# Altium footprint library SMD RUS IC.PcbLib: 31 footprints (part 1 of 2)
Each footprint in its own frame and in the unit in brackets; x right, y up, seen from the top. Pads: shape width x height; smd on the part's side, far side on the other; paste and mask are expansions set on the pad; w line width, h text height; cw(c..) or ccw(c..) is an arc to the next point about the centre after c.
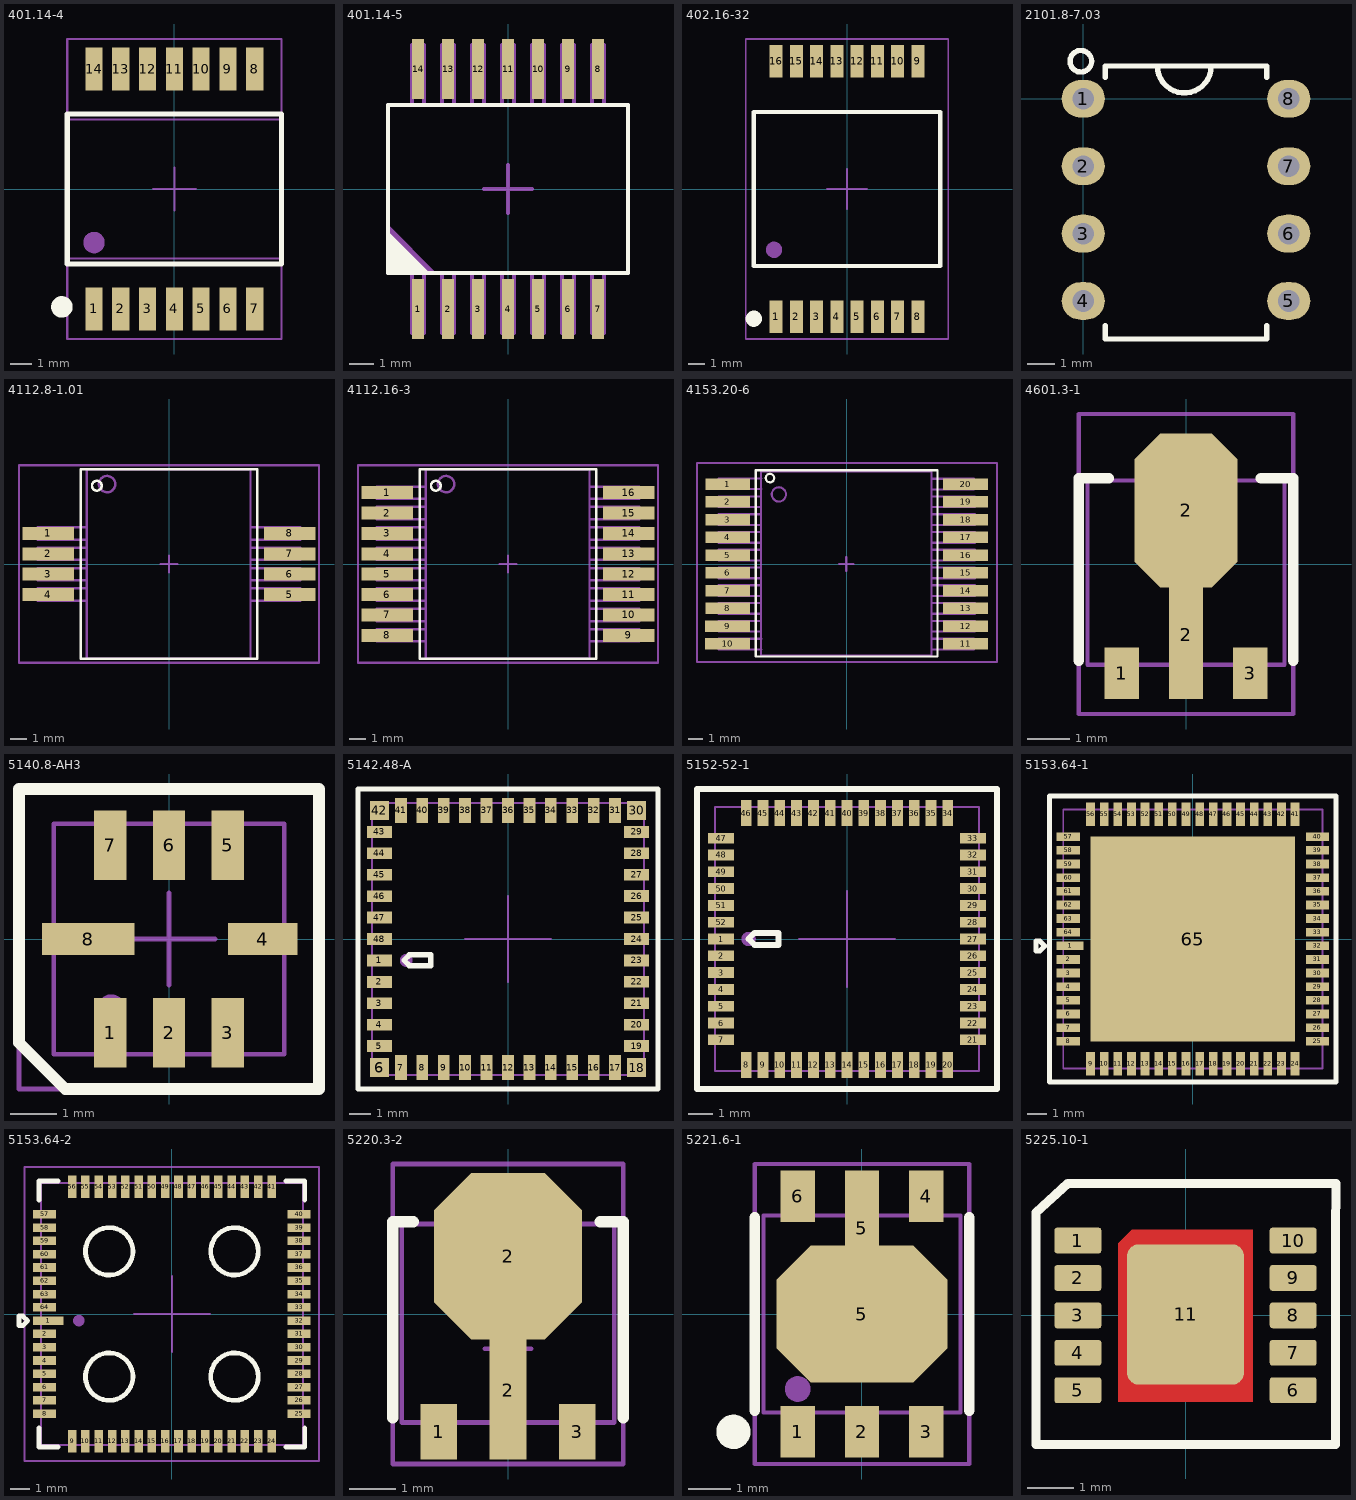
[diagram p0: the footprints below, top view; thin cyan lines are the x and y axes]

## 401.14-4 [mm]
pads (14):
  rect 0.8x2 smd: 1(-3.75,-5.6) 2(-2.5,-5.6) 3(-1.25,-5.6) 4(0,-5.6) 5(1.25,-5.6) 6(2.5,-5.6) 7(3.75,-5.6) 8(3.75,5.6) 9(2.5,5.6) 10(1.25,5.6) 11(0,5.6) 12(-1.25,5.6) 13(-2.5,5.6) 14(-3.75,5.6)
Top Overlay:
  circle w0.5: c-5.25,-5.5 r0.25
  lines w0.25: -5,-3.5 5,-3.5 5,3.5 -5,3.5 -5,-3.5
Mechanical 7:
  lines w0.05: -5,-7 5,-7 5,7 -5,7 -5,-7
  text ".Designator" at -3,-0.5 h2
Mechanical 13:
  circle w0.5: c-3.75,-2.5 r0.25
  lines w0.1: -5,-3.25 -5,3.25 5,3.25 5,-3.25 -5,-3.25
Mechanical 15:
  lines w0.1: -1,0 1,0 ; 0.001,-1 0.001,1 ; -5,-7 -5,7 5,7 5,-7 -5,-7
3D body "401,14-4.stp": height 2.4, standoff 0, extent -5,-7.25 5,7.25

## 401.14-5 [mm]
height 1.85
pads (14):
  rect 0.5x2.5 smd: 1(-3.75,-5) 2(-2.5,-5) 3(-1.25,-5) 4(0,-5) 5(1.25,-5) 6(2.5,-5) 7(3.75,-5) 8(3.75,5) 9(2.5,5) 10(1.25,5) 11(0,5) 12(-1.25,5) 13(-2.5,5) 14(-3.75,5)
Top Overlay:
  region: -5,-1.75 -5,-3.5 -3.25,-3.5
  lines w0.15: -5,-3.5 5,-3.5 5,3.5 -5,3.5 -5,-3.5
Mechanical 15:
  lines w0.15: -1,0 1,0 ; 0,-1 0,1
Mechanical 29:
  region: -5,-3.5 -5,-1.5 -3,-3.5
  lines w0.15: -4,-3.5 -4,-6 -3.5,-6 -3.5,-5.5 -3.5,-3.5 ; -4,3.5 -4,5.5 -4,6 -3.5,6 -3.5,3.5 ; -2.75,-3.5 -2.75,-6 -2.25,-6 -2.25,-5.5 -2.25,-3.5 ; -2.75,3.5 -2.75,5.5 -2.75,6 -2.25,6 -2.25,3.5 ; -1.5,-3.5 -1.5,-6 -1,-6 -1,-5.5 -1,-3.5 ; -1.5,3.5 -1.5,5.5 -1.5,6 -1,6 -1,3.5 ; -0.25,-3.5 -0.25,-6 0.25,-6 0.25,-5.5 0.25,-3.5 ; -0.25,3.5 -0.25,5.5 -0.25,6 0.25,6 0.25,3.5 ; 1,-3.5 1,-6 1.5,-6 1.5,-5.5 1.5,-3.5 ; 1,3.5 1,5.5 1,6 1.5,6 1.5,3.5 ; 2.25,-3.5 2.25,-6 2.75,-6 2.75,-5.5 2.75,-3.5 ; 2.25,3.5 2.25,5.5 2.25,6 2.75,6 2.75,3.5 ; 3.5,-3.5 3.5,-6 4,-6 4,-5.5 4,-3.5 ; 3.5,3.5 3.5,5.5 3.5,6 4,6 4,3.5 ; -5,-3.5 5,-3.5 5,3.5 -5,3.5 -5,-3.5
  text ".Designator" at -3.6,-0.3 h1
3D body "401.14-5.STEP": height 3, standoff -0.03, extent -5,-6.35 5,6.35

## 402.16-32 [mm]
pads (16):
  rect 0.8x2 smd: 1(-4.375,-7.875) 2(-3.125,-7.875) 3(-1.875,-7.875) 4(-0.625,-7.875) 5(0.625,-7.875) 6(1.875,-7.875) 7(3.125,-7.875) 8(4.375,-7.875) 9(4.375,7.875) 10(3.125,7.875) 11(1.875,7.875) 12(0.625,7.875) 13(-0.625,7.875) 14(-1.875,7.875) 15(-3.125,7.875) 16(-4.375,7.875)
Top Overlay:
  circle w0.5: c-5.75,-8 r0.25
  lines w0.25: -5.75,-4.75 -5.75,4.75 5.75,4.75 5.75,-4.75 -5.75,-4.75
Mechanical 7:
  lines w0.05: -6.25,-9.25 6.25,-9.25 6.25,9.25 -6.25,9.25 -6.25,-9.25
  text ".Designator" at -3,-0.5 h2
Mechanical 13:
  circle w0.5: c-4.5,-3.75 r0.25
  lines w0.1: -5.75,-4.75 5.75,-4.75 5.75,4.75 -5.75,4.75 -5.75,-4.75
Mechanical 15:
  lines w0.1: -1.25,0 1.25,0 ; 0,-1.25 0,1.25 ; -6.25,-9.25 6.25,-9.25 6.25,9.25 -6.25,9.25 -6.25,-9.25
3D body "User Library-402_16-23.step": height 2.35, standoff 0, extent -5.75,-8.068 5.799,8.067

## 2101.8-7.03 [mm]
pads (8):
  oval 1.6x1.4 / inner round 1.4 / far side oval 2.2x1.4 hole 0.8: 1(0,0) 2(0,-2.5) 3(0,-5) 4(0,-7.5) 5(7.62,-7.5) 6(7.62,-5) 7(7.62,-2.5) 8(7.62,0)
Top Overlay:
  circle w0.2: c-0.09,1.39 r0.4
  lines w0.2: 0.81,-8.41 0.81,-8.91 6.81,-8.91 6.81,-8.41 ; 0.81,0.79 0.81,1.215 6.81,1.215 6.81,0.79 ; 2.746,1.215 ccw(c3.746,1.215) 4.746,1.215
3D body "User Library-2101_8-7.x_b": height 4.8, standoff -2.4, extent -0.075,-8.76 7.745,1.24

## 4112.8-1.01 [mm] "CFP, 8-Leads, Body 11,60x9,40mm (max), Pitch 1,25mm, IPC Medium Density"
height 3
pads (8):
  rect 3.15x0.8 smd: 1(-7.4,1.875) 2(-7.4,0.625) 3(-7.4,-0.625) 4(-7.4,-1.875) 5(7.4,-1.875) 6(7.4,-0.625) 7(7.4,0.625) 8(7.4,1.875)
Top Overlay:
  circle w0.15: c-4.425,4.8 r0.3
  lines w0.15: -5.425,-5.8 5.425,-5.8 5.425,5.8 -5.425,5.8 -5.425,-5.8
Mechanical 15:
  lines w0.15: -0.5,0 0.5,0 ; 0,-0.5 0,0.5 ; -9.2,-6.05 9.2,-6.05 9.2,6.05 -9.2,6.05 -9.2,-6.05
Mechanical 29:
  circle w0.15: c-3.8,4.9 r0.5
  lines w0.15: -5.05,-2.25 -8.05,-2.25 -8.05,-1.5 -5.05,-1.5 ; -5.05,-1 -8.05,-1 -8.05,-0.25 -5.05,-0.25 ; -5.05,0.25 -8.05,0.25 -8.05,1 -5.05,1 ; -5.05,1.5 -8.05,1.5 -8.05,2.25 -5.05,2.25 ; 5.05,-2.25 8.05,-2.25 8.05,-1.5 5.05,-1.5 ; 5.05,-1 8.05,-1 8.05,-0.25 5.05,-0.25 ; 5.05,0.25 8.05,0.25 8.05,1 5.05,1 ; 5.05,1.5 8.05,1.5 8.05,2.25 5.05,2.25 ; -5.05,-5.8 5,-5.8 5,5.8 -5.05,5.8 -5.05,-5.8
  text ".Designator" at -3.7,-0.3 h1
3D body "User Library-4112_8-1.x_b": height 2.65, standoff 0, extent -8.067,-5.75 8.067,5.75

## 4112.16-3 [mm] "CFP, 16-Leads, Body 11,60x9,40mm (max), Pitch 1,25mm, IPC Medium Density"
height 3
pads (16):
  rect 3.15x0.8 smd: 1(-7.4,4.375) 2(-7.4,3.125) 3(-7.4,1.875) 4(-7.4,0.625) 5(-7.4,-0.625) 6(-7.4,-1.875) 7(-7.4,-3.125) 8(-7.4,-4.375) 9(7.4,-4.375) 10(7.4,-3.125) 11(7.4,-1.875) 12(7.4,-0.625) 13(7.4,0.625) 14(7.4,1.875) 15(7.4,3.125) 16(7.4,4.375)
Top Overlay:
  circle w0.15: c-4.425,4.8 r0.3
  lines w0.15: -5.425,-5.8 -5.425,5.8 5.425,5.8 5.425,-5.8 -5.425,-5.8
Mechanical 15:
  lines w0.15: -0.5,0 0.5,0 ; 0,-0.5 0,0.5 ; -9.2,-6.05 -9.2,6.05 9.2,6.05 9.2,-6.05 -9.2,-6.05
Mechanical 29:
  circle w0.15: c-3.8,4.9 r0.5
  lines w0.15: -5.05,-4.75 -8.05,-4.75 -8.05,-4 -5.05,-4 ; -5.05,-3.5 -8.05,-3.5 -8.05,-2.75 -5.05,-2.75 ; -5.05,-2.25 -8.05,-2.25 -8.05,-1.5 -5.05,-1.5 ; -5.05,-1 -8.05,-1 -8.05,-0.25 -5.05,-0.25 ; -5.05,0.25 -8.05,0.25 -8.05,1 -5.05,1 ; -5.05,1.5 -8.05,1.5 -8.05,2.25 -5.05,2.25 ; -5.05,2.75 -8.05,2.75 -8.05,3.5 -5.05,3.5 ; -5.05,4 -8.05,4 -8.05,4.75 -5.05,4.75 ; 5.05,-4.75 8.05,-4.75 8.05,-4 5.05,-4 ; 5.05,-3.5 8.05,-3.5 8.05,-2.75 5.05,-2.75 ; 5.05,-2.25 8.05,-2.25 8.05,-1.5 5.05,-1.5 ; 5.05,-1 8.05,-1 8.05,-0.25 5.05,-0.25 ; 5.05,0.25 8.05,0.25 8.05,1 5.05,1 ; 5.05,1.5 8.05,1.5 8.05,2.25 5.05,2.25 ; 5.05,2.75 8.05,2.75 8.05,3.5 5.05,3.5 ; 5.05,4 8.05,4 8.05,4.75 5.05,4.75 ; -5.05,-5.8 -5.05,5.8 5,5.8 5,-5.8 -5.05,-5.8
  text ".Designator" at -3.7,-0.3 h1
3D body "4112.16-3.step": height 2.5, standoff 0, extent -8.5,-5.8 8.5,5.8

## 4153.20-6 [mm] "CFP, 20-Leads, Body 11.80x13.25mm (max), Pitch 1,25mm, IPC Medium Density"
height 3
pads (20):
  rect 3.15x0.8 smd: 1(-8.37,5.625) 2(-8.37,4.375) 3(-8.37,3.125) 4(-8.37,1.875) 5(-8.37,0.625) 6(-8.37,-0.625) 7(-8.37,-1.875) 8(-8.37,-3.125) 9(-8.38,-4.375) 10(-8.38,-5.625) 11(8.38,-5.625) 12(8.38,-4.375) 13(8.38,-3.125) 14(8.38,-1.875) 15(8.38,-0.625) 16(8.38,0.625) 17(8.38,1.875) 18(8.38,3.125) 19(8.38,4.375) 20(8.38,5.625)
Top Overlay:
  circle w0.15: c-5.395,6.05 r0.3
  lines w0.15: 6.4,-6.52 -6.395,-6.52 -6.395,6.6 6.405,6.6 6.405,-6.52
Mechanical 15:
  lines w0.15: -0.52,0 0.48,0 ; -0.02,-0.5 -0.02,0.5 ; -10.53,-6.91 10.59,-6.91 10.59,7.1 -10.53,7.1 -10.53,-6.91
Mechanical 29:
  circle w0.15: c-4.77,4.9 r0.5
  lines w0.15: -6.02,-4.75 -9.02,-4.75 -9.02,-4 -6.02,-4 ; -6.02,-3.5 -9.02,-3.5 -9.02,-2.75 -6.02,-2.75 ; -6.02,-2.25 -9.02,-2.25 -9.02,-1.5 -6.02,-1.5 ; -6.02,-1 -9.02,-1 -9.02,-0.25 -6.02,-0.25 ; -6.02,0.25 -9.02,0.25 -9.02,1 -6.02,1 ; -6.02,1.5 -9.02,1.5 -9.02,2.25 -6.02,2.25 ; -6.02,2.75 -9.02,2.75 -9.02,3.5 -6.02,3.5 ; -6.02,4 -9.02,4 -9.02,4.75 -6.02,4.75 ; -6.01,-6.01 -9.01,-6.01 -9.01,-5.26 -6.01,-5.26 ; -6.01,5.27 -9.01,5.27 -9.01,6.02 -6.01,6.02 ; 5.97,-6.01 8.97,-6.01 8.97,-5.26 5.97,-5.26 ; 5.98,5.25 8.98,5.25 8.98,6 5.98,6 ; 6.03,-4.75 9.03,-4.75 9.03,-4 6.03,-4 ; 6.03,-3.5 9.03,-3.5 9.03,-2.75 6.03,-2.75 ; 6.03,-2.25 9.03,-2.25 9.03,-1.5 6.03,-1.5 ; 6.03,-1 9.03,-1 9.03,-0.25 6.03,-0.25 ; 6.03,0.25 9.03,0.25 9.03,1 6.03,1 ; 6.03,1.5 9.03,1.5 9.03,2.25 6.03,2.25 ; 6.03,2.75 9.03,2.75 9.03,3.5 6.03,3.5 ; 6.03,4 9.03,4 9.03,4.75 6.03,4.75 ; -6.02,-6.44 5.98,-6.44 5.98,6.52 -6.02,6.52 -6.02,-6.44
  text ".Designator" at -4.67,-0.3 h1
3D body "User Library-4153_20-6.step": height 3.14, standoff 0.1, extent -8.84,-6.5 8.66,6.5

## 4601.3-1 [mm]
height 1.6
pads (4):
  rect 0.8x1.2 smd: 1(-1.5,-2.55) 3(1.5,-2.55)
  rect 0.8x3 smd: 2(0,-1.65)
  oct 2.4x3.6 smd: 2(0,1.25)
Top Overlay:
  lines w0.25: -2.5,-2.25 -2.5,2 -1.8,2 ; 1.75,2 2.45,2 ; 2.5,-2.25 2.5,2
Mechanical 7:
  lines w0.05: -2.5,-3.5 -2.5,3.5 2.5,3.5 2.5,-3.5 -2.5,-3.5
  text ".Designator" at -2,-0.5 h1.5
Mechanical 13:
  lines w0.1: -1.8,-2.35 -1.8,-2.95 -1.2,-2.95 -1.2,-2.35 ; -0.3,-2.35 -0.3,-2.95 0.3,-2.95 0.3,-2.35 ; -0.3,1.95 -0.3,2.55 0.3,2.55 0.3,1.95 ; 1.2,-2.35 1.2,-2.95 1.8,-2.95 1.8,-2.35 ; -2.3,-2.35 2.3,-2.35 2.3,1.95 -2.3,1.95 -2.3,-2.35
Mechanical 15:
  lines w0.1: -0.5,0 0.5,0 ; 0,-0.5 0,0.5 ; -2.5,-3.5 2.5,-3.5 2.5,3.5 -2.5,3.5 -2.5,-3.5
3D body "User Library-4601_3-1.step": height 1.74, standoff 0, extent -2.3,-3.1 2.3,2.1

## 5140.8-АН3 [mm]
height 1.95
pads (8):
  rect 0.7x1.5 smd: 1(-1.27,-2.032) 2(0,-2.032) 3(1.27,-2.032) 5(1.27,2.032) 6(0,2.032) 7(-1.27,2.032)
  rect 1.5x0.7 smd: 4(2.032,0)
  rect 2x0.7 smd: 8(-1.75,0)
Top Overlay:
  lines w0.25: -3.25,-2.25 -2.25,-3.25 3.25,-3.25 3.25,3.25 -3.25,3.25 -3.25,-2.25
Mechanical 7:
  lines w0.05: -3.25,-3.25 3.25,-3.25 3.25,3.25 -3.25,3.25 -3.25,-3.25
  text ".Designator" at -2,-0.5 h1.5
Mechanical 13:
  circle w0.3: c-1.25,-1.5 r0.15
  lines w0.1: -2.5,-2.5 -2.5,2.5 2.5,2.5 2.5,-2.5 -2.5,-2.5
Mechanical 15:
  lines w0.1: -1,0 1,0 ; 0,-1 0,1 ; -3.25,-3.25 -3.25,3.25 3.25,3.25 3.25,-3.25 -3.25,-3.25
3D body: height 0.05, standoff 0, extent 1.125,-0.5 2.375,0.5
3D body: height 1.5, standoff 0.05, extent -2.5,-2.5 2.5,2.5
3D body: height 1.8, standoff 1.5, extent -2.25,-2.25 2.25,2.25
3D body: height 1.85, standoff 1.8, extent -2.2,-2.2 2.2,2.2
3D body: height 1.95, standoff 1.8, extent -2.15,-2.15 2.15,2.15
3D body: height 0.05, standoff 0, extent 0.75,1.125 1.75,2.375
3D body: height 0.05, standoff 0, extent -0.5,1.125 0.5,2.375
3D body: height 0.05, standoff 0, extent -1.75,1.125 -0.75,2.375
3D body: height 0.05, standoff 0, extent 0.775,-2.375 1.775,-1.125
3D body: height 0.05, standoff 0, extent -0.5,-2.375 0.5,-1.125
3D body: height 0.05, standoff 0, extent -1.75,-2.375 -0.75,-1.125
3D body: height 0.05, standoff 0, extent -2.375,-0.5 -0.5,0.5
3D body: height 1.45, standoff 0, extent 2.125,-0.5 2.375,0.5
3D body: height 1.45, standoff 0, extent 0.75,2.125 1.75,2.375
3D body: height 1.45, standoff 0, extent -0.5,2.125 0.5,2.375
3D body: height 1.45, standoff 0, extent -1.75,2.125 -0.75,2.375
3D body: height 1.45, standoff 0, extent -2.375,-0.5 -2.125,0.5
3D body: height 1.45, standoff 0, extent -1.75,-2.375 -0.75,-2.125
3D body: height 1.45, standoff 0, extent -0.5,-2.375 0.5,-2.125
3D body: height 1.45, standoff 0, extent 0.775,-2.375 1.775,-2.125

## 5142.48-A [mm]
height 2.5
pads (48):
  rect 1.15x0.55 smd: 1(-6,-1) 2(-6,-2) 3(-6,-3) 4(-6,-4) 5(-6,-5) 19(6,-5) 20(6,-4) 21(6,-3) 22(6,-2) 23(6,-1) 24(6,0) 25(6,1) 26(6,2) 27(6,3) 28(6,4) 29(6,5) 43(-6,5) 44(-6,4) 45(-6,3) 46(-6,2) 47(-6,1) 48(-6,0)
  rect 0.9x0.9 smd: 6(-6,-6) 18(6,-6) 30(6,6) 42(-6,6)
  rect 0.55x1.15 smd: 7(-5,-6) 8(-4,-6) 9(-3,-6) 10(-2,-6) 11(-1,-6) 12(0,-6) 13(1,-6) 14(2,-6) 15(3,-6) 16(4,-6) 17(5,-6) 31(5,6) 32(4,6) 33(3,6) 34(2,6) 35(1,6) 36(0,6) 37(-1,6) 38(-2,6) 39(-3,6) 40(-4,6) 41(-5,6)
Top Overlay:
  lines w0.25: -7,-7 -7,7 7,7 7,-7 -7,-7 ; -4.856,-0.992 -4.606,-1.242 -3.606,-1.242 -3.606,-0.742 -4.606,-0.742 -4.856,-0.992
Mechanical 7:
  lines w0.05: -7,-7 7,-7 7,7 -7,7 -7,-7
  text ".Designator" at -3,-0.5 h2
Mechanical 13:
  circle w0.3: c-4.75,-1 r0.15
  lines w0.1: -6.35,-6.35 6.35,-6.35 6.35,6.35 -6.35,6.35 -6.35,-6.35
Mechanical 15:
  lines w0.1: -2,0 2,0 ; 0,-2 0,2 ; -7,-7 -7,7 7,7 7,-7 -7,-7
3D body "5142.48-A.stp": height 2.12, standoff 0, extent -6.35,-6.35 6.35,6.35

## 5152-52-1 [mm]
height 2.06
pads (52):
  rect 1.1x0.45 smd: 1(-5.25,0) 2(-5.25,-0.7) 3(-5.25,-1.4) 4(-5.25,-2.1) 5(-5.25,-2.8) 6(-5.25,-3.5) 7(-5.25,-4.2) 21(5.25,-4.2) 22(5.25,-3.5) 23(5.25,-2.8) 24(5.25,-2.1) 25(5.25,-1.4) 26(5.25,-0.7) 27(5.25,0) 28(5.25,0.7) 29(5.25,1.4) 30(5.25,2.1) 31(5.25,2.8) 32(5.25,3.5) 33(5.25,4.2) 47(-5.25,4.2) 48(-5.25,3.5) 49(-5.25,2.8) 50(-5.25,2.1) 51(-5.25,1.4) 52(-5.25,0.7)
  rect 0.45x1.1 smd: 8(-4.2,-5.25) 9(-3.5,-5.25) 10(-2.8,-5.25) 11(-2.1,-5.25) 12(-1.4,-5.25) 13(-0.7,-5.25) 14(0,-5.25) 15(0.7,-5.25) 16(1.4,-5.25) 17(2.1,-5.25) 18(2.8,-5.25) 19(3.5,-5.25) 20(4.2,-5.25) 34(4.2,5.25) 35(3.5,5.25) 36(2.8,5.25) 37(2.1,5.25) 38(1.4,5.25) 39(0.7,5.25) 40(0,5.25) 41(-0.7,5.25) 42(-1.4,5.25) 43(-2.1,5.25) 44(-2.8,5.25) 45(-3.5,5.25) 46(-4.2,5.25)
Top Overlay:
  lines w0.25: -6.25,-6.25 6.25,-6.25 6.25,6.25 -6.25,6.25 -6.25,-6.25 ; -4.106,0.008 -3.856,0.258 -2.856,0.258 -2.856,-0.242 -3.856,-0.242 -4.106,0.008
Mechanical 7:
  lines w0.05: -6.25,-6.25 -6.25,6.25 6.25,6.25 6.25,-6.25 -6.25,-6.25
  text ".Designator" at -3,-0.5 h2
Mechanical 13:
  circle w0.3: c-4.1,0 r0.15
  lines w0.1: -5.5,-5.5 -5.5,5.5 5.5,5.5 5.5,-5.5 -5.5,-5.5
Mechanical 15:
  lines w0.1: -2,0 2,0 ; 0,-2 0,2 ; -6.25,-6.25 6.25,-6.25 6.25,6.25 -6.25,6.25 -6.25,-6.25
3D body: height 1, standoff 0.01, extent 3.3,5.5 3.7,5.575
3D body: height 1, standoff 0.01, extent 4,5.5 4.4,5.575
3D body: height 1, standoff 0.01, extent 1.9,5.5 2.3,5.575
3D body: height 1, standoff 0.01, extent 2.6,5.5 3,5.575
3D body: height 1, standoff 0.01, extent 1.2,5.5 1.6,5.575
3D body: height 1, standoff 0.01, extent 0.5,5.5 0.9,5.575
3D body: height 1, standoff 0.01, extent -0.9,5.5 -0.5,5.575
3D body: height 1, standoff 0.01, extent -0.2,5.5 0.2,5.575
3D body: height 1, standoff 0.01, extent -2.3,5.5 -1.9,5.575
3D body: height 1, standoff 0.01, extent -1.6,5.5 -1.2,5.575
3D body: height 1, standoff 0.01, extent -3,5.5 -2.6,5.575
3D body: height 1, standoff 0.01, extent -3.7,5.5 -3.3,5.575
3D body: height 1, standoff 0.01, extent -4.4,5.5 -4,5.575
3D body: height 1, standoff 0.01, extent 5.5,-3.7 5.575,-3.3
3D body: height 1, standoff 0.01, extent 5.5,-4.4 5.575,-4
3D body: height 1, standoff 0.01, extent 5.5,-2.3 5.575,-1.9
3D body: height 1, standoff 0.01, extent 5.5,-3 5.575,-2.6
3D body: height 1, standoff 0.01, extent 5.5,-1.6 5.575,-1.2
3D body: height 1, standoff 0.01, extent 5.5,-0.9 5.575,-0.5
3D body: height 1, standoff 0.01, extent 5.5,0.5 5.575,0.9
3D body: height 1, standoff 0.01, extent 5.5,-0.2 5.575,0.2
3D body: height 1, standoff 0.01, extent 5.5,1.9 5.575,2.3
3D body: height 1, standoff 0.01, extent 5.5,1.2 5.575,1.6
3D body: height 1, standoff 0.01, extent 5.5,2.6 5.575,3
3D body: height 1, standoff 0.01, extent 5.5,3.3 5.575,3.7
3D body: height 1, standoff 0.01, extent 5.5,4 5.575,4.4
3D body: height 1, standoff 0.01, extent 4,-5.575 4.4,-5.5
3D body: height 1, standoff 0.01, extent 3.3,-5.575 3.7,-5.5
3D body: height 1, standoff 0.01, extent 2.6,-5.575 3,-5.5
3D body: height 1, standoff 0.01, extent 1.2,-5.575 1.6,-5.5
3D body: height 1, standoff 0.01, extent 1.9,-5.575 2.3,-5.5
3D body: height 1, standoff 0.01, extent -0.2,-5.575 0.2,-5.5
3D body: height 1, standoff 0.01, extent 0.5,-5.575 0.9,-5.5
3D body: height 1, standoff 0.01, extent -0.9,-5.575 -0.5,-5.5
3D body: height 1, standoff 0.01, extent -1.6,-5.575 -1.2,-5.5
3D body: height 1, standoff 0.01, extent -3,-5.575 -2.6,-5.5
3D body: height 1, standoff 0.01, extent -2.3,-5.575 -1.9,-5.5
3D body: height 1, standoff 0.01, extent -4.4,-5.575 -4,-5.5
3D body: height 1, standoff 0.01, extent -3.7,-5.575 -3.3,-5.5
3D body: height 1, standoff 0.01, extent -5.575,-4.4 -5.5,-4
3D body: height 1, standoff 0.01, extent -5.575,-3.7 -5.5,-3.3
3D body: height 1, standoff 0.01, extent -5.575,-2.3 -5.5,-1.9
3D body: height 1, standoff 0.01, extent -5.575,-3 -5.5,-2.6
3D body: height 1, standoff 0.01, extent -5.575,-0.9 -5.5,-0.5
3D body: height 1, standoff 0.01, extent -5.575,-1.6 -5.5,-1.2
3D body: height 1, standoff 0.01, extent -5.575,3.3 -5.5,3.7
3D body: height 1, standoff 0.01, extent -5.575,4 -5.5,4.4
3D body: height 1, standoff 0.01, extent -5.575,1.9 -5.5,2.3
3D body: height 1, standoff 0.01, extent -5.575,2.6 -5.5,3
3D body: height 1, standoff 0.01, extent -5.575,1.2 -5.5,1.6
3D body: height 1, standoff 0.01, extent -5.575,0.5 -5.5,0.9
3D body: height 1.6, standoff 0.01, extent -5.575,-0.2 -5.5,0.2
3D body: height 1.6, standoff 1.5, extent -5.5,-0.2 -4,0.2
3D body: height 1.9, standoff 1.5, extent -4.5,-4.5 4.5,4.5
3D body: height 2, standoff 1.9, extent -4,-4 4,4
3D body: height 1.5, standoff 0.01, extent -5.5,-5.5 5.5,5.5

## 5153.64-1 [mm]
height 2.06
pads (65):
  rect 1.4x0.45 smd: 1(-6.3,-0.35)
  rect 1.2x0.45 smd: 2(-6.4,-1.05) 3(-6.4,-1.75) 4(-6.4,-2.45) 5(-6.4,-3.15) 6(-6.4,-3.85) 7(-6.4,-4.55) 8(-6.4,-5.25) 25(6.4,-5.25) 26(6.4,-4.55) 27(6.4,-3.85) 28(6.4,-3.15) 29(6.4,-2.45) 30(6.4,-1.75) 31(6.4,-1.05) 32(6.4,-0.35) 33(6.4,0.35) 34(6.4,1.05) 35(6.4,1.75) 36(6.4,2.45) 37(6.4,3.15) 38(6.4,3.85) 39(6.4,4.55) 40(6.4,5.25) 57(-6.4,5.25) 58(-6.4,4.55) 59(-6.4,3.85) 60(-6.4,3.15) 61(-6.4,2.45) 62(-6.4,1.75) 63(-6.4,1.05) 64(-6.4,0.35)
  rect 0.45x1.2 smd: 9(-5.25,-6.4) 10(-4.55,-6.4) 11(-3.85,-6.4) 12(-3.15,-6.4) 13(-2.45,-6.4) 14(-1.75,-6.4) 15(-1.05,-6.4) 16(-0.35,-6.4) 17(0.35,-6.4) 18(1.05,-6.4) 19(1.75,-6.4) 20(2.45,-6.4) 21(3.15,-6.4) 22(3.85,-6.4) 23(4.55,-6.4) 24(5.25,-6.4) 41(5.25,6.4) 42(4.55,6.4) 43(3.85,6.4) 44(3.15,6.4) 45(2.45,6.4) 46(1.75,6.4) 47(1.05,6.4) 48(0.35,6.4) 49(-0.35,6.4) 50(-1.05,6.4) 51(-1.75,6.4) 52(-2.45,6.4) 53(-3.15,6.4) 54(-3.85,6.4) 55(-4.55,6.4) 56(-5.25,6.4)
  rect 10.5x10.5 smd: 65(0,0)
Top Overlay:
  lines w0.25: -8.05,-0.608 -8.05,-0.108 -7.844,-0.108 -7.594,-0.358 -7.844,-0.608 -8.05,-0.608 ; -7.35,-7.35 7.35,-7.35 7.35,7.35 -7.35,7.35 -7.35,-7.35
Mechanical 7:
  lines w0.05: -7.35,-7.35 -7.35,7.35 7.35,7.35 7.35,-7.35 -7.35,-7.35
  text ".Designator" at -3,-0.5 h2
Mechanical 13:
  circle w0.3: c-4.9,-0.35 r0.15
  lines w0.1: -6.65,-6.65 -6.65,6.65 6.65,6.65 6.65,-6.65 -6.65,-6.65
  text "Check!" at -3.5,-0.5 h1.52
Mechanical 15:
  lines w0.1: -2,0 2,0 ; 0,-2 0,2 ; -7.35,-7.35 7.35,-7.35 7.35,7.35 -7.35,7.35 -7.35,-7.35
3D body: height 1, standoff 0.01, extent -6.725,-1.95 -6.65,-1.55
3D body: height 1.9, standoff 1.5, extent -5.6,-5.6 5.6,5.6
3D body: height 2, standoff 1.9, extent -5.25,-5.25 5.25,5.25
3D body: height 1.5, standoff 0.01, extent -6.65,-6.65 6.65,6.65
3D body: height 1, standoff 0.01, extent -6.725,-1.25 -6.65,-0.85
3D body: height 1, standoff 0.01, extent -6.725,-2.65 -6.65,-2.25
3D body: height 1, standoff 0.01, extent -6.725,-3.35 -6.65,-2.95
3D body: height 1, standoff 0.01, extent -6.725,-4.05 -6.65,-3.65
3D body: height 1, standoff 0.01, extent -6.725,-4.75 -6.65,-4.35
3D body: height 1, standoff 0.01, extent -6.725,-5.45 -6.65,-5.05
3D body: height 1, standoff 0.01, extent -6.725,5.05 -6.65,5.45
3D body: height 1, standoff 0.01, extent -6.725,4.35 -6.65,4.75
3D body: height 1, standoff 0.01, extent -6.725,3.65 -6.65,4.05
3D body: height 1, standoff 0.01, extent -6.725,2.95 -6.65,3.35
3D body: height 1, standoff 0.01, extent -6.725,2.25 -6.65,2.65
3D body: height 1, standoff 0.01, extent -6.725,1.55 -6.65,1.95
3D body: height 1, standoff 0.01, extent -6.725,0.85 -6.65,1.25
3D body: height 1, standoff 0.01, extent -6.725,0.15 -6.65,0.55
3D body: height 1, standoff 0.01, extent 0.15,6.65 0.55,6.725
3D body: height 1, standoff 0.01, extent 0.85,6.65 1.25,6.725
3D body: height 1, standoff 0.01, extent 1.55,6.65 1.95,6.725
3D body: height 1, standoff 0.01, extent 2.25,6.65 2.65,6.725
3D body: height 1, standoff 0.01, extent 2.95,6.65 3.35,6.725
3D body: height 1, standoff 0.01, extent 3.65,6.65 4.05,6.725
3D body: height 1, standoff 0.01, extent 4.35,6.65 4.75,6.725
3D body: height 1, standoff 0.01, extent 5.05,6.65 5.45,6.725
3D body: height 1, standoff 0.01, extent -5.45,6.65 -5.05,6.725
3D body: height 1, standoff 0.01, extent -4.75,6.65 -4.35,6.725
3D body: height 1, standoff 0.01, extent -4.05,6.65 -3.65,6.725
3D body: height 1, standoff 0.01, extent -3.35,6.65 -2.95,6.725
3D body: height 1, standoff 0.01, extent -2.65,6.65 -2.25,6.725
3D body: height 1, standoff 0.01, extent -1.95,6.65 -1.55,6.725
3D body: height 1, standoff 0.01, extent -1.25,6.65 -0.85,6.725
3D body: height 1, standoff 0.01, extent -0.55,6.65 -0.15,6.725
3D body: height 1, standoff 0.01, extent 0.15,-6.725 0.55,-6.65
3D body: height 1, standoff 0.01, extent 0.85,-6.725 1.25,-6.65
3D body: height 1, standoff 0.01, extent 1.55,-6.725 1.95,-6.65
3D body: height 1, standoff 0.01, extent 2.25,-6.725 2.65,-6.65
3D body: height 1, standoff 0.01, extent 2.95,-6.725 3.35,-6.65
3D body: height 1, standoff 0.01, extent 3.65,-6.725 4.05,-6.65
3D body: height 1, standoff 0.01, extent 4.35,-6.725 4.75,-6.65
3D body: height 1, standoff 0.01, extent 5.05,-6.725 5.45,-6.65
3D body: height 1, standoff 0.01, extent -5.45,-6.725 -5.05,-6.65
3D body: height 1, standoff 0.01, extent -4.75,-6.725 -4.35,-6.65
3D body: height 1, standoff 0.01, extent -4.05,-6.725 -3.65,-6.65
3D body: height 1, standoff 0.01, extent -3.35,-6.725 -2.95,-6.65
3D body: height 1, standoff 0.01, extent -2.65,-6.725 -2.25,-6.65
3D body: height 1, standoff 0.01, extent -1.95,-6.725 -1.55,-6.65
3D body: height 1, standoff 0.01, extent -1.25,-6.725 -0.85,-6.65
3D body: height 1, standoff 0.01, extent -0.55,-6.725 -0.15,-6.65
3D body: height 1, standoff 0.01, extent 6.65,0.15 6.725,0.55
3D body: height 1, standoff 0.01, extent 6.65,0.85 6.725,1.25
3D body: height 1, standoff 0.01, extent 6.65,1.55 6.725,1.95
3D body: height 1, standoff 0.01, extent 6.65,2.25 6.725,2.65
3D body: height 1, standoff 0.01, extent 6.65,2.95 6.725,3.35
3D body: height 1, standoff 0.01, extent 6.65,3.65 6.725,4.05
3D body: height 1, standoff 0.01, extent 6.65,4.35 6.725,4.75
3D body: height 1, standoff 0.01, extent 6.65,5.05 6.725,5.45
3D body: height 1, standoff 0.01, extent 6.65,-5.45 6.725,-5.05
3D body: height 1, standoff 0.01, extent 6.65,-4.75 6.725,-4.35
3D body: height 1, standoff 0.01, extent 6.65,-4.05 6.725,-3.65
3D body: height 1, standoff 0.01, extent 6.65,-3.35 6.725,-2.95
3D body: height 1, standoff 0.01, extent 6.65,-2.65 6.725,-2.25
3D body: height 1, standoff 0.01, extent 6.65,-1.95 6.725,-1.55
3D body: height 1, standoff 0.01, extent 6.65,-1.25 6.725,-0.85
3D body: height 1, standoff 0.01, extent 6.65,-0.55 6.725,-0.15
3D body: height 1, standoff 0.01, extent -6.725,-0.55 -6.65,-0.15

## 5153.64-2 [mm]
height 2.06
pads (64):
  rect 1.6x0.45 smd: 1(-6.5,-0.35)
  rect 1.2x0.45 smd: 2(-6.7,-1.05) 3(-6.7,-1.75) 4(-6.7,-2.45) 5(-6.7,-3.15) 6(-6.7,-3.85) 7(-6.7,-4.55) 8(-6.7,-5.25) 25(6.7,-5.25) 26(6.7,-4.55) 27(6.7,-3.85) 28(6.7,-3.15) 29(6.7,-2.45) 30(6.7,-1.75) 31(6.7,-1.05) 32(6.7,-0.35) 33(6.7,0.35) 34(6.7,1.05) 35(6.7,1.75) 36(6.7,2.45) 37(6.7,3.15) 38(6.7,3.85) 39(6.7,4.55) 40(6.7,5.25) 57(-6.7,5.25) 58(-6.7,4.55) 59(-6.7,3.85) 60(-6.7,3.15) 61(-6.7,2.45) 62(-6.7,1.75) 63(-6.7,1.05) 64(-6.7,0.35)
  rect 0.45x1.2 smd: 9(-5.25,-6.7) 10(-4.55,-6.7) 11(-3.85,-6.7) 12(-3.15,-6.7) 13(-2.45,-6.7) 14(-1.75,-6.7) 15(-1.05,-6.7) 16(-0.35,-6.7) 17(0.35,-6.7) 18(1.05,-6.7) 19(1.75,-6.7) 20(2.45,-6.7) 21(3.15,-6.7) 22(3.85,-6.7) 23(4.55,-6.7) 24(5.25,-6.7) 41(5.25,6.7) 42(4.55,6.7) 43(3.85,6.7) 44(3.15,6.7) 45(2.45,6.7) 46(1.75,6.7) 47(1.05,6.7) 48(0.35,6.7) 49(-0.35,6.7) 50(-1.05,6.7) 51(-1.75,6.7) 52(-2.45,6.7) 53(-3.15,6.7) 54(-3.85,6.7) 55(-4.55,6.7) 56(-5.25,6.7)
Top Overlay:
  circle w0.25: c3.3,-3.3 r1.25
  circle w0.25: c-3.3,-3.3 r1.25
  circle w0.25: c-3.3,3.3 r1.25
  circle w0.25: c3.3,3.3 r1.25
  lines w0.25: -7,-6 -7,-7 -6,-7 ; -7,6 -7,7 -6,7 ; 6,-7 7,-7 7,-6 ; 6,7 7,7 7,6 ; -8.05,-0.608 -7.844,-0.608 -7.594,-0.358 -7.844,-0.108 -8.05,-0.108 -8.05,-0.608
Mechanical 7:
  lines w0.05: -7.75,-7.75 -7.75,7.75 7.75,7.75 7.75,-7.75 -7.75,-7.75
  text ".Designator" at -3,-0.5 h2
Mechanical 13:
  circle w0.3: c-4.9,-0.35 r0.15
  lines w0.1: -6.9,-6.9 6.9,-6.9 6.9,6.9 -6.9,6.9 -6.9,-6.9
Mechanical 15:
  lines w0.1: -2,0 2,0 ; 0,-2 0,2 ; -7.75,-7.75 -7.75,7.75 7.75,7.75 7.75,-7.75 -7.75,-7.75
3D body: height 1.2, standoff 0.01, extent -6.975,-0.55 -6.9,-0.15
3D body: height 1, standoff 0.01, extent 6.9,-0.55 6.975,-0.15
3D body: height 1, standoff 0.01, extent 6.9,-1.25 6.975,-0.85
3D body: height 1, standoff 0.01, extent 6.9,-1.95 6.975,-1.55
3D body: height 1, standoff 0.01, extent 6.9,-2.65 6.975,-2.25
3D body: height 1, standoff 0.01, extent 6.9,-3.35 6.975,-2.95
3D body: height 1, standoff 0.01, extent 6.9,-4.05 6.975,-3.65
3D body: height 1, standoff 0.01, extent 6.9,-4.75 6.975,-4.35
3D body: height 1, standoff 0.01, extent 6.9,-5.45 6.975,-5.05
3D body: height 1, standoff 0.01, extent 6.9,5.05 6.975,5.45
3D body: height 1, standoff 0.01, extent 6.9,4.35 6.975,4.75
3D body: height 1, standoff 0.01, extent 6.9,3.65 6.975,4.05
3D body: height 1, standoff 0.01, extent 6.9,2.95 6.975,3.35
3D body: height 1, standoff 0.01, extent 6.9,2.25 6.975,2.65
3D body: height 1, standoff 0.01, extent 6.9,1.55 6.975,1.95
3D body: height 1, standoff 0.01, extent 6.9,0.85 6.975,1.25
3D body: height 1, standoff 0.01, extent 6.9,0.15 6.975,0.55
3D body: height 1, standoff 0.01, extent -0.55,-6.975 -0.15,-6.9
3D body: height 1, standoff 0.01, extent -1.25,-6.975 -0.85,-6.9
3D body: height 1, standoff 0.01, extent -1.95,-6.975 -1.55,-6.9
3D body: height 1, standoff 0.01, extent -2.65,-6.975 -2.25,-6.9
3D body: height 1, standoff 0.01, extent -3.35,-6.975 -2.95,-6.9
3D body: height 1, standoff 0.01, extent -4.05,-6.975 -3.65,-6.9
3D body: height 1, standoff 0.01, extent -4.75,-6.975 -4.35,-6.9
3D body: height 1, standoff 0.01, extent -5.45,-6.975 -5.05,-6.9
3D body: height 1, standoff 0.01, extent 5.05,-6.975 5.45,-6.9
3D body: height 1, standoff 0.01, extent 4.35,-6.975 4.75,-6.9
3D body: height 1, standoff 0.01, extent 3.65,-6.975 4.05,-6.9
3D body: height 1, standoff 0.01, extent 2.95,-6.975 3.35,-6.9
3D body: height 1, standoff 0.01, extent 2.25,-6.975 2.65,-6.9
3D body: height 1, standoff 0.01, extent 1.55,-6.975 1.95,-6.9
3D body: height 1, standoff 0.01, extent 0.85,-6.975 1.25,-6.9
3D body: height 1, standoff 0.01, extent 0.15,-6.975 0.55,-6.9
3D body: height 1, standoff 0.01, extent -0.55,6.9 -0.15,6.975
3D body: height 1, standoff 0.01, extent -1.25,6.9 -0.85,6.975
3D body: height 1, standoff 0.01, extent -1.95,6.9 -1.55,6.975
3D body: height 1, standoff 0.01, extent -2.65,6.9 -2.25,6.975
3D body: height 1, standoff 0.01, extent -3.35,6.9 -2.95,6.975
3D body: height 1, standoff 0.01, extent -4.05,6.9 -3.65,6.975
3D body: height 1, standoff 0.01, extent -4.75,6.9 -4.35,6.975
3D body: height 1, standoff 0.01, extent -5.45,6.9 -5.05,6.975
3D body: height 1, standoff 0.01, extent 5.05,6.9 5.45,6.975
3D body: height 1, standoff 0.01, extent 4.35,6.9 4.75,6.975
3D body: height 1, standoff 0.01, extent 3.65,6.9 4.05,6.975
3D body: height 1, standoff 0.01, extent 2.95,6.9 3.35,6.975
3D body: height 1, standoff 0.01, extent 2.25,6.9 2.65,6.975
3D body: height 1, standoff 0.01, extent 1.55,6.9 1.95,6.975
3D body: height 1, standoff 0.01, extent 0.85,6.9 1.25,6.975
3D body: height 1, standoff 0.01, extent 0.15,6.9 0.55,6.975
3D body: height 1, standoff 0.01, extent -6.975,0.15 -6.9,0.55
3D body: height 1, standoff 0.01, extent -6.975,0.85 -6.9,1.25
3D body: height 1, standoff 0.01, extent -6.975,1.55 -6.9,1.95
3D body: height 1, standoff 0.01, extent -6.975,2.25 -6.9,2.65
3D body: height 1, standoff 0.01, extent -6.975,2.95 -6.9,3.35
3D body: height 1, standoff 0.01, extent -6.975,3.65 -6.9,4.05
3D body: height 1, standoff 0.01, extent -6.975,4.35 -6.9,4.75
3D body: height 1, standoff 0.01, extent -6.975,5.05 -6.9,5.45
3D body: height 1, standoff 0.01, extent -6.975,-5.45 -6.9,-5.05
3D body: height 1, standoff 0.01, extent -6.975,-4.75 -6.9,-4.35
3D body: height 1, standoff 0.01, extent -6.975,-4.05 -6.9,-3.65
3D body: height 1, standoff 0.01, extent -6.975,-3.35 -6.9,-2.95
3D body: height 1, standoff 0.01, extent -6.975,-2.65 -6.9,-2.25
3D body: height 1, standoff 0.01, extent -6.975,-1.25 -6.9,-0.85
3D body: height 1.5, standoff 0.01, extent -6.9,-6.9 6.9,6.9
3D body: height 2, standoff 1.9, extent -6.7,-6.7 6.7,6.7
3D body: height 1.9, standoff 1.5, extent -6.8,-6.8 6.8,6.8
3D body: height 1, standoff 0.01, extent -6.975,-1.95 -6.9,-1.55

## 5220.3-2 [mm] "КТ-99-1"
height 1.6
pads (4):
  rect 0.8x1.2 smd: 1(-1.5,-2.55) 3(1.5,-2.55)
  rect 0.8x3 smd: 2(0,-1.65)
  oct 3.2x3.6 smd: 2(0,1.25)
Top Overlay:
  lines w0.25: -2.5,-2.25 -2.5,2 -2.05,2 ; 2,2 2.45,2 ; 2.5,-2.25 2.5,2
Mechanical 7:
  lines w0.05: -2.5,-3.25 2.5,-3.25 2.5,3.25 -2.5,3.25 -2.5,-3.25
  text ".Designator" at -2,-0.5 h1.5
Mechanical 13:
  lines w0.1: -1.8,-2.35 -1.8,-2.95 -1.2,-2.95 -1.2,-2.35 ; -0.3,-2.35 -0.3,-2.95 0.3,-2.95 0.3,-2.35 ; -0.3,1.95 -0.3,2.55 0.3,2.55 0.3,1.95 ; 1.2,-2.35 1.2,-2.95 1.8,-2.95 1.8,-2.35 ; -2.3,-2.35 -2.3,1.95 2.3,1.95 2.3,-2.35 -2.3,-2.35
Mechanical 15:
  lines w0.1: -0.5,-0.75 0.5,-0.75 ; 0,-1.25 0,-0.25 ; -2.5,-3.25 -2.5,3.25 2.5,3.25 2.5,-3.25 -2.5,-3.25
3D body "User Library-5220_3-2.step": height 1.63, standoff 0.02, extent -2.3,-3 2.3,2.25

## 5221.6-1 [mm]
height 1.7
pads (7):
  rect 0.8x1.2 smd: 1(-1.5,-2.75) 2(0,-2.75) 3(1.5,-2.75) 4(1.5,2.75) 6(-1.5,2.75)
  oct 4x3.2 smd: 5(0,0)
  rect 0.8x2.7 smd: 5(0,2)
Top Overlay:
  circle w0.4: c-3,-2.75 r0.2
  lines w0.25: -2.5,-2.25 -2.5,2.25 ; 2.5,-2.25 2.5,2.25
Mechanical 7:
  lines w0.05: -2.5,-3.5 2.5,-3.5 2.5,3.5 -2.5,3.5 -2.5,-3.5
  text ".Designator" at -2,-0.5 h1.5
Mechanical 13:
  circle w0.3: c-1.5,-1.75 r0.15
  lines w0.1: -1.8,-2.3 -1.8,-3 -1.2,-3 -1.2,-2.3 ; -1.8,2.3 -1.8,3 -1.2,3 -1.2,2.3 ; -0.3,-2.3 -0.3,-3 0.3,-3 0.3,-2.3 ; -0.3,2.3 -0.3,3 0.3,3 0.3,2.3 ; 1.2,-2.3 1.2,-3 1.8,-3 1.8,-2.3 ; 1.2,2.3 1.2,3 1.8,3 1.8,2.3 ; -2.3,-2.3 2.3,-2.3 2.3,2.3 -2.3,2.3 -2.3,-2.3
Mechanical 15:
  lines w0.1: -0.5,0 0.5,0 ; 0,-0.5 0,0.5 ; -2.5,-3.5 2.5,-3.5 2.5,3.5 -2.5,3.5 -2.5,-3.5
3D body: height 0.25, standoff 0.01, extent 1.2,2.25 1.8,3
3D body: height 0.25, standoff 0.01, extent -0.3,2.25 0.3,3
3D body: height 0.25, standoff 0.01, extent -1.8,2.25 -1.2,3
3D body: height 0.25, standoff 0.01, extent 1.2,-3 1.8,-2.25
3D body: height 0.25, standoff 0.01, extent -0.3,-3 0.3,-2.25
3D body: height 0.25, standoff 0.01, extent -1.8,-3 -1.2,-2.25
3D body: height 1, standoff 0.01, extent -2.3,-2.3 2.3,2.3
3D body: height 1.5, standoff 1, extent -2,-1.875 2,1.875

## 5225.10-1 [mm]
height 1.1
pads (11):
  rrect20% 1x0.55 smd: 1(-2.3,1.6) 2(-2.3,0.8) 3(-2.3,0) 4(-2.3,-0.8) 5(-2.3,-1.6) 6(2.3,-1.6) 7(2.3,-0.8) 8(2.3,0) 9(2.3,0.8) 10(2.3,1.6)
  rrect20% 2.5x3 smd paste+0 mask+0: 11(0,0.02)
Top Layer:
  region: 1.435,1.83 1.435,-1.84 -1.435,-1.84 -1.435,1.54 -1.145,1.83
Top Overlay:
  lines w0.2: -3.195,-2.76 -2.485,-2.76 0.285,-2.76 2.165,-2.76 3.205,-2.76 3.205,1.71 3.216,2.82 0.305,2.82 -2.514,2.82 -3.195,2.198 -3.195,-2.76
3D body "5225.10-1.x_t": height 1, standoff 0, extent -2.545,-2.54 2.555,2.56